# Altium schematic symbol library CRCW0805470RJNEA.SchLib: 1 symbol
Pins are listed as number, name and electrical type; pins without a type are passive.

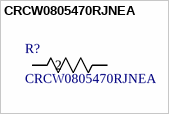
[diagram p0: symbol CRCW0805470RJNEA]

## CRCW0805470RJNEA
designator R?
No Description Available; Manufacturer_Name: Vishay; Copyright: Copyright (C) 2026 Ultra Librarian. All rights reserved.; Manufacturer_Part_Number: CRCW0805470RJNEA; Datasheet: https://www.vishay.com/doc?20035
footprint RC0805N_VIS
pins: 1, 2